# Altium schematic symbol library Crystal_Osilator.SchLib: 109 symbols (part 2 of 2)
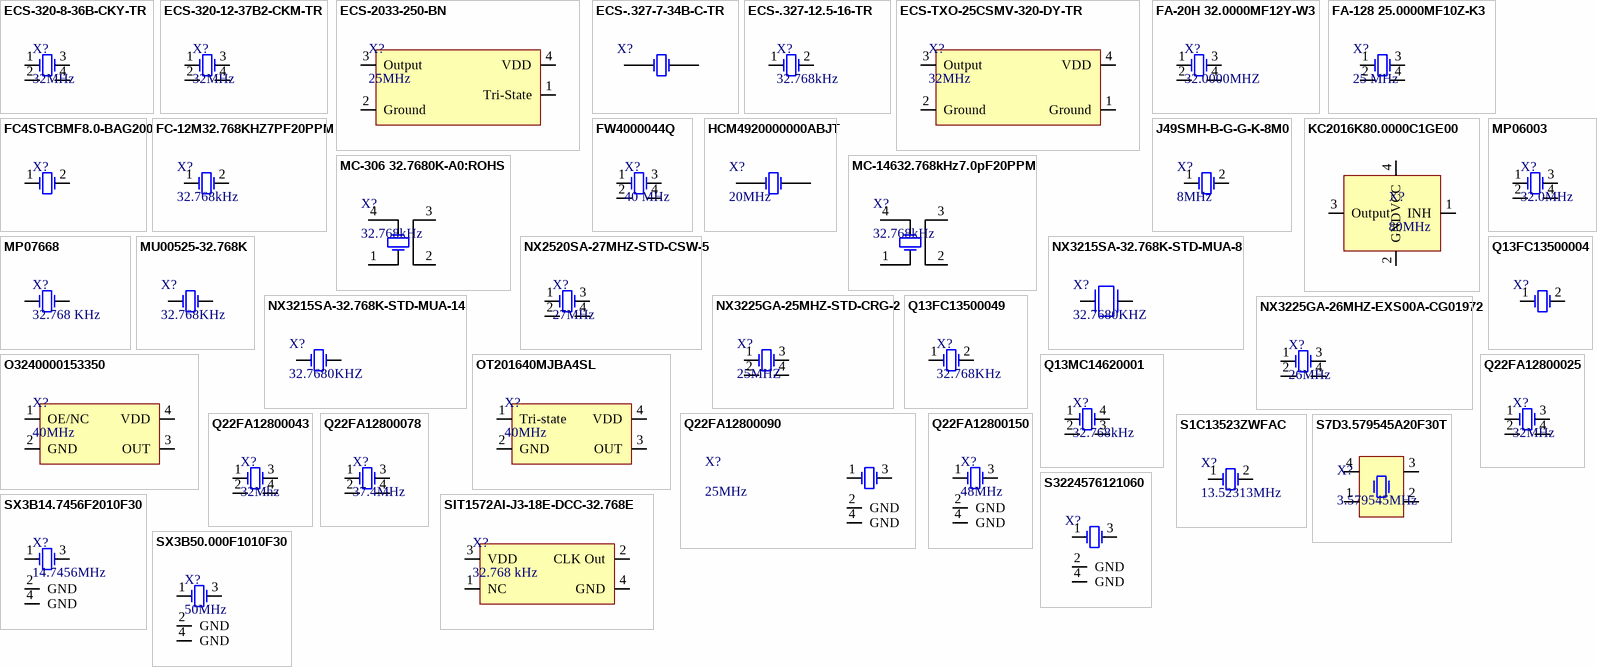
[diagram p3: symbols ECS-320-8-36B-CKY-TR to SX3B50.000F1010F30]

## NX3215SA-32.768K-STD-MUA-8
designator X?, comment 32.7680KHZ
CRYSTAL 32.7680KHZ 12.5PF SMD; Manufacturer: NDK; Manufacturer Part Number: NX3215SA-32.768K-STD-MUA-8; Frequency: 32.768kHz; Frequency Tolerance: 20ppm; ESR (Equivalent Series Resistance): 70kR; Supplier 1: Digi-Key; Stock 1: 29951; Pricing 1: 1=0.68, 10=0.602, 50=0.5628, 100=0.4974, 500=0.47124, 1000=0.3927 (USD); Mount: Surface Mount; Case/Package: SMD/SMT; Number of Pins: 2; Min Operating Temperature: -40°C; Max Operating Temperature: 85°C; Package Quantity: 1000; Load Capacitance: 12.5pF; Packaging: Tape and Reel; Length: 0.126inch; Height: 0.035inch; Width: 0.059inch; Lead Free: Lead Free; ComponentLink1URL: https://media.digikey.com/pdf/Data%20Sheets/NDK%20PDFs/NX3215SA-32.768K-STD-MUA-8.pdf?src-supplier=Digi-Key; ComponentLink1Description: https://media.digikey.com/pdf/Data%20Sheets/NDK%20PDFs/NX3215SA-32.768K-STD-MUA-8.pdf?src-supplier=Digi-Key; ComponentLink2URL: http://www.ndk.com/images/products/catalog/c_NX3215SA-STD-MUA-14_e.pdf?src-supplier=Digi-Key; ComponentLink2Description: http://www.ndk.com/images/products/catalog/c_NX3215SA-STD-MUA-14_e.pdf?src-supplier=Digi-Key; Supplier Part Number 1: 644-1156-6-ND; LCSC Part Number: C156245
footprint NX3215SA-32.768K-STD-MUA-8_
pins: 1, 2

## NX3215SA-32.768K-STD-MUA-14
designator X?, comment 32.7680KHZ
CRYSTAL 32.7680KHZ 6PF SMD; Manufacturer: NDK; Manufacturer Part Number: NX3215SA-32.768K-STD-MUA-14; Frequency: 32.768kHz; Frequency Tolerance: 20ppm; ESR (Equivalent Series Resistance): 70kR; Supplier 1: Rs; RoHS: Yes; Category: Crystals; Stock 1: 500; Pricing 1: 5=0.15520, 50=0.68600, 100=0.66600, 250=0.65000, 500=0.63400 (GBP); Mounting Technology: Surface Mount; Case/Package: SMD/SMT; Min Operating Temperature: -40°C; Max Operating Temperature: 85°C; Packaging: Cut Tape; Load Capacitance: 6pF; Series: NX3215SA; RoHS Compliant: Yes; ComponentLink1URL: https://datasheet.ciiva.com/6733/c-nx3215sa-std-mua-9-e-6733110.pdf?src-supplier=Digi-Key; ComponentLink1Description: https://datasheet.ciiva.com/6733/c-nx3215sa-std-mua-9-e-6733110.pdf?src-supplier=Digi-Key; ComponentLink2URL: https://datasheet.ciiva.com/6733/c-nx3215sa-std-mua-9-e-6733111.pdf?src-supplier=Digi-Key; ComponentLink2Description: https://datasheet.ciiva.com/6733/c-nx3215sa-std-mua-9-e-6733111.pdf?src-supplier=Digi-Key; ComponentLink3URL: https://datasheet.ciiva.com/6733/c-nx3215sa-std-mua-9-e-6733112.pdf?src-supplier=Digi-Key; ComponentLink3Description: https://datasheet.ciiva.com/6733/c-nx3215sa-std-mua-9-e-6733112.pdf?src-supplier=Digi-Key; Supplier Part Number 1: 1847854; LCSC Part Number: C156244; Item Type: Crystal
footprint NX3215SA-32.768K-STD-MUA-8_
pins: 1 OSC1, 2 OSC2

## NX3225GA-25MHZ-STD-CRG-2
designator X?, comment 25MHZ
SMD3225-4P Crystals ROHS; Manufacturer: NDK; Manufacturer Part Number: NX3225GA-25MHZ-STD-CRG-2; Package: SMD3225-4P; LCSC Part Number: C438901; Item Type: Crystal; ComponentLink1Description: LCSC; ComponentLink1URL: https://www.lcsc.com/product-detail/Crystals_NDK-NX3225GA-25MHZ-STD-CRG-2_C438901.html
footprint NX3225GA-25MHZ-STD-CRG-2
pins: 1 OSC1, 2 GND, 3 OSC2, 4 GND

## NX3225GA-26MHZ-EXS00A-CG01972
designator X?, comment 26MHz
SMD3225-4P Crystals ROHS; Manufacturer: NDK; Manufacturer Part Number: NX3225GA-26MHZ-EXS00A-CG01972; Package: SMD3225-4P; LCSC Part Number: C485372; Item Type: Crystal; ComponentLink1Description: LCSC; ComponentLink1URL: https://www.lcsc.com/product-detail/Crystals_NDK-NX3225GA-26MHZ-EXS00A-CG01972_C485372.html
footprint NX3225GA-26MHZ-EXS00A-CG01972
pins: 1 OSC1, 2 GND, 3 OSC2, 4 GND

## O3240000153350
designator X?, comment 40MHz
3.3V 5mA ±25ppm 40MHz CMOS SMD3225-4P Oscillators ROHS; Manufacturer: JGHC; Manufacturer Part Number: O3240000153350; Item Type: Crystal; Value: 40MHZ; LCSC Part Number: C437132; ComponentLink1Description: LCSC; ComponentLink1URL: https://www.lcsc.com/product-detail/Oscillators_JGHC-O3240000153350_C437132.html
footprint SMD3225-4P
pins: 1 OE/NC, 2 GND, 3 OUT, 4 VDD

## OT201640MJBA4SL
designator X?, comment 40MHz
1.8V~3.3V 4mA ±10ppm 40MHz SMD2016-4P Oscillators ROHS; Manufacturer: YXC; Manufacturer Part Number: OT201640MJBA4SL; Item Type: Crystal; Value: 40MHZ; LCSC Part Number: C669085; ComponentLink1Description: LCSC; ComponentLink1URL: https://www.lcsc.com/product-detail/Crystals_Yangxing-Tech-X322540MPB4SI_C9010.html
footprint SMD2016-4P
pins: 1 Tri-state, 2 GND, 3 OUT, 4 VDD

## Q13FC13500004
designator X?
32.768kHz Surface Mount Crystal 12.5pF ±20ppm SMD3215-2P Crystals ROHS; Manufacturer: Epson; Manufacturer Part Number: Q13FC13500004; Supplier: Farnell; LCSC Part Number: C32346; RoHS: Yes; Item Type: Crystals; Stock: 52665; Reach SVHC Compliant: 4187SVHC; ComponentLink1URL: https://datasheet.octopart.com/Q13FC13500004-Epson-datasheet-62043850.pdf?src-supplier=Farnell; ComponentLink1Description: https://datasheet.octopart.com/Q13FC13500004-Epson-datasheet-62043850.pdf?src-supplier=Farnell; ComponentLink2URL: https://datasheet.octopart.com/Q13FC13500004-Epson-datasheet-32025749.pdf?src-supplier=Newark; ComponentLink2Description: https://datasheet.octopart.com/Q13FC13500004-Epson-datasheet-32025749.pdf?src-supplier=Newark
footprint SMD3215-2P
pins: 1 OSC1, 2 OSC2

## Q13FC13500049
designator X?, comment 32.768KHz
Crystal, 32.768KHZ, 6PF, 3.2MM X 1.5MM Rohs Compliant: Yes; Manufacturer: Epson; Manufacturer Part Number: Q13FC13500049; Supplier: Farnell; LCSC Part Number: C95361; RoHS: No; Item Type: Crystal; Stock: 760; Pricing: 100=5.52, 250=5.41 (DKK)
footprint SMD3215-2P
pins: 1 OSC1, 2 OSC2

## Q13MC14620001
designator X?, comment 32.768kHz
32.768kHz 7pF ±20ppm MC-146 Crystals ROHS; Manufacturer: Seiko Epson; Manufacturer Part Number: Q13MC14620001; Package: MC-146; LCSC Part Number: C3013800; Item Type: Crystals; ComponentLink1Description: LCSC; ComponentLink1URL: https://www.lcsc.com/product-detail/Crystals_Seiko-span-style-background-color-ff0-Epson-span-Q13MC14620001_C3013800.html
footprint MC-146_
pins: 1 OSC1, 2 GND, 3 GND, 4 OSC2

## Q22FA12800025
designator X?, comment 32MHz
CRYSTAL 32.0000MHZ 8PF SMD; Manufacturer: Epson; Manufacturer Part Number: Q22FA12800025; Supplier: Farnell; LCSC Part Number: C187794; RoHS: Yes; Item Type: Crystal; Stock: 250; Pricing: 250=0.511 (GBP); ComponentLink1URL: http://ndap3-net.ebz.epson.co.jp/w/www/PDFS/epdoc_qd.nsf/85a4e2c523a1f89349257068002f9e30/255cb2884010a1f9492571f0004c7d72/$FILE/FA-128_E09X.pdf?src-supplier=Newark; ComponentLink1Description: http://ndap3-net.ebz.epson.co.jp/w/www/PDFS/epdoc_qd.nsf/85a4e2c523a1f89349257068002f9e30/255cb2884010a1f9492571f0004c7d72/$FILE/FA-128_E09X.pdf?src-supplier=Newark; ComponentLink2URL: http://www.farnell.com/datasheets/1734615.pdf?src-supplier=Newark; ComponentLink2Description: http://www.farnell.com/datasheets/1734615.pdf?src-supplier=Newark
footprint SMD2016-4P
pins: 1 OSC1, 2 GND, 3 OSC2, 4 GND

## Q22FA12800043
designator X?, comment 32Mhz
32MHz 8pF ±10ppm ±20ppm SMD2016-4P Crystals ROHS; Manufacturer: Epson; Manufacturer Part Number: Q22FA12800043; Supplier: Farnell; LCSC Part Number: C1986927; RoHS: No; Item Type: Crystal; Pricing: 1=1, 10=0.828, 25=0.765, 50=0.701, 100=0.638 (GBP); ComponentLink1URL: https://datasheet.octopart.com/Q22FA12800043-Epson-datasheet-61206169.pdf?src-supplier=Farnell; ComponentLink1Description: https://datasheet.octopart.com/Q22FA12800043-Epson-datasheet-61206169.pdf?src-supplier=Farnell
footprint SMD2016-4P
pins: 1 OSC1, 2 GND, 3 OSC2, 4 GND

## Q22FA12800078
designator X?, comment 37.4MHz
37.4MHz SMD Crystal Resonator 9pF 60Ω ±10ppm -40℃~+85℃ SMD2016-4P Crystals; Manufacturer: Seiko; Manufacturer Part Number: Q22FA12800078; Footprint: Custom; ComponentLink1Description: LCSC; ComponentLink1URL: https://www.lcsc.com/product-detail/Crystals_Seiko-Epson-Q22FA12800078_C255897.html; LCSC Part Number: C255897
footprint Q22FA12800078_ (37.4MHz SMD Crystal Resonator 9pF 60O ±10ppm -40?~+85? SMD2016-4P Crystals)
pins: 1 OSC1, 2 GND, 3 OSC2, 4 GND

## Q22FA12800090
designator X?, comment 25MHz
CRYSTAL 25.0000MHZ 12PF SMD; Manufacturer: Seiko Epson; Manufacturer Part Number: Q22FA12800090; ComponentLink1Description: LCSC; ComponentLink1URL: https://www.lcsc.com/product-detail/Crystals_Seiko-Epson-Q22FA12800090_C255883.html; Package: SMD2016-4P; LCSC Part Number: C255883; Item Type: Crystal
footprint Q22FA12800090
pins: 1 OSC1, 2 GND, 3 OSC2, 4 GND

## Q22FA12800150
designator X?, comment 48MHz
CRYSTAL 48.0000MHZ 10PF SMD; Manufacturer: Epson; Manufacturer Part Number: Q22FA12800150; Supplier: Farnell; LCSC Part Number: C255900; Item Type: Crystal; Pricing: 500=0.24 (GBP)
footprint SMD2016-4P
pins: 1 OSC1, 2 GND, 3 OSC2, 4 GND

## S1C13523ZWFAC
designator X?, comment 13.52313MHz
13.52313MHz In-line passive crystal oscillator 20pF 60Ω ±20ppm ±30ppm -40℃~+85℃ HC-49S-2P Crystals ROHS; Manufacturer: JYJE; Manufacturer Part Number: S1C13523ZWFAC; Package: HC-49S-2P; LCSC Part Number: C2681243; ComponentLink1Description: LCSC; ComponentLink1URL: https://www.lcsc.com/product-detail/Crystals_JYJE-S1C13523ZWFAC_C2681243.html
footprint HC-49S-2P
pins: 1 OSC1, 2 OSC2

## S7D3.579545A20F30T
designator X?, comment 3.579545MHz
5V~5V ±20ppm CMOS 3.579545MHz SMD7050-4P Oscillators ROHS; Manufacturer: Shenzhen SCTF Elec; Manufacturer Part Number: S7D3.579545A20F30T; Item Type: Crystal; Package: SMD7050-4P; LCSC Part Number: C386914; ComponentLink1Description: LCSC; ComponentLink1URL: https://www.lcsc.com/product-detail/Oscillators_Shenzhen-SCTF-Elec-S7D3-579545A20F30T_C386914.html
footprint SMD7050-4P
pins: 1 ENABLE CONTROL, 2 GND, 3 OUT PUT , 4 VDD

## S3224576121060
designator X?
24.576MHz SMD Crystal Resonator 12pF 60Ω ±10ppm -40℃~+85℃ SMD3225-4P Crystals ROHS; Manufacturer: JGHC; Manufacturer Part Number: S3224576121060; Footprint: Custom; ComponentLink1Description: LCSC; ComponentLink1URL: https://lcsc.com/product-detail/Crystals_JGHC-S3224576121060_C390772.html; Value: 24.576MHz; LCSC Part Number: C390772
footprint S3224576121060_ (24.576MHz SMD Crystal Resonator 12pF 60O ±10ppm -40?~+85? SMD3225-4P Crystals ROHS)
pins: 1 OSC1, 2 GND, 3 OSC2, 4 GND

## SIT1572AI-J3-18E-DCC-32.768E
designator X?, comment 32.768 kHz
MEMS OSC XO 32.7680KHZ LVCMOS; Manufacturer: SiTime; Manufacturer Part Number: SIT1572AI-J3-18E-DCC-32.768E; Item Type: Oscillators; Frequency Stability: 50ppm; Max Supply Current: 5.3uA; Supplier: Digikey; LCSC Part Number: C1988615; RoHS: Yes; Stock: 1183; Pricing: 1=1.91, 10=1.646, 50=1.4844, 100=1.4202, 500=1.28206 (USD); Mounting Technology: Surface Mount; Min Operating Temperature: -40°C; Max Operating Temperature: 85°C; Series: SiT1572; Packaging: Cut Tape; Frequency: 32.768kHz; RoHS Compliant: Yes; ComponentLink1URL: https://www.sitime.com/datasheet/SiT1572?src-supplier=Digikey; ComponentLink1Description: https://www.sitime.com/datasheet/SiT1572?src-supplier=Digikey
footprint SIT1572AI-J3-18E-DCC-32.768E
pins: 1 NC, 2 CLK Out, 3 VDD, 4 GND

## SX3B14.7456F2010F30
designator X?, comment 14.7456MHz
14.7456MHz Surface Mount Crystal 20pF ±10ppm ±30ppm SMD3225-4P Crystals ROHS; Manufacturer: Shenzhen SCTF Elec; Manufacturer Part Number: SX3B14.7456F2010F30; Supplier: LCSC; LCSC Part Number: C2901666; RoHS: No; Item Type: Crystal; Stock: 2580; Pricing: 5=0.0774, 50=0.0625, 150=0.0551, 500=0.0495, 3000=0.0447, 6000=0.0425 (USD)
footprint SMD3225-4P
pins: 1 OSC1, 2 GND, 3 OSC2, 4 GND

## SX3B50.000F1010F30
designator X?, comment 50MHz
50MHz 贴片晶振 10pF ±10ppm ±30ppm SMD3225-4P Crystals ROHS; Manufacturer: Shenzhen SCTF Elec; Manufacturer Part Number: SX3B50.000F1010F30; Package: SMD3225-4P; LCSC Part Number: C2901717; Item Type: Crystal; ComponentLink1Description: LCSC; ComponentLink1URL: https://www.lcsc.com/product-detail/Crystals_Shenzhen-SCTF-Elec-SX3B50-000F1010F30_C2901717.html
footprint SMD3225-4P
pins: 1 OSC1, 2 GND, 3 OSC2, 4 GND

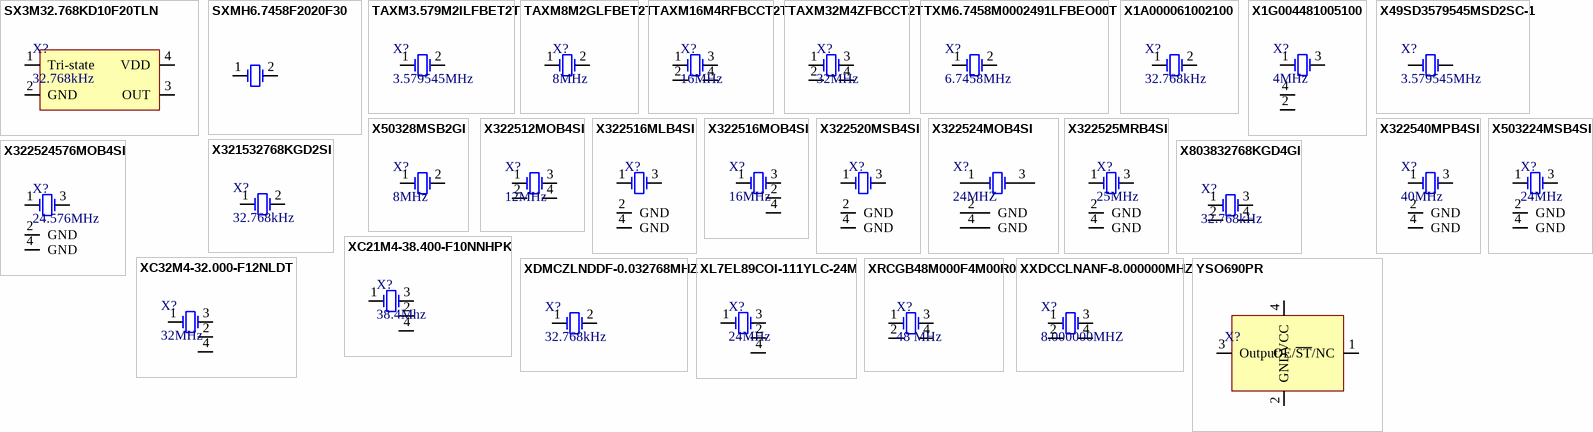
[diagram p2: symbols SX3M32.768KD10F20TLN to YSO690PR]

## SX3M32.768KD10F20TLN
designator X?, comment 32.768kHz
1.8V ±10ppm ±20ppm CMOS 32.768kHz SMD3225-4P Crystal Oscillators ROHS; Manufacturer: Shenzhen SCTF Elec; Manufacturer Part Number: SX3M32.768KD10F20TLN; Package: SMD3225-4P; LCSC Part Number: C21547574; Item Type: Crystal Oscillator; ComponentLink1Description: LCSC; ComponentLink1URL: https://www.lcsc.com/product-detail/Crystal-Oscillators_Shenzhen-SCTF-Elec-SX3M32-768KD10F20TLN_C21547574.html
footprint SMD3225-4P
pins: 1 Tri-state, 2 GND, 3 OUT, 4 VDD

## SXMH6.7458F2020F30
designator X?
6.7458MHz 20pF ±20ppm HC-49S-SMD Crystals ROHS; Manufacturer: Shenzhen SCTF Elec; Manufacturer Part Number: SXMH6.7458F2020F30; Package: HC-49S-SMD; LCSC Part Number: C2901748; Item Type: Crystals; ComponentLink1Description: LCSC; ComponentLink1URL: https://www.lcsc.com/product-detail/Crystals_Shenzhen-SCTF-Elec-SXMH6-7458F2020F30_C2901748.html
footprint HC-49S-SMD
pins: 1 OSC1, 2 OSC2

## TAXM3.579M2ILFBET2T
designator X?, comment 3.579545MHz
3.579545MHz 20pF ±30ppm HC-49S-SMD Crystals ROHS; Manufacturer: TAE; Manufacturer Part Number: TAXM3.579M2ILFBET2T; Package: HC-49S-SMD; LCSC Part Number: C362352; Item Type: Crystal; ComponentLink1Description: LCSC; ComponentLink1URL: https://www.lcsc.com/product-detail/Crystals_TAE-Zhejiang-Abel-Elec-TAXM3-579M2ILFBET2T_C362352.html
footprint HC-49S-SMD
pins: 1 OSC1, 2 OSC2

## TAXM8M2GLFBET2T
designator X?, comment 8MHz
8MHz Surface Mount Crystal 20pF ±30ppm ±30ppm HC-49S-SMD Crystals ROHS; Manufacturer: Yajingxin; Manufacturer Part Number: TAXM8M2GLFBET2T; Package: HC-49S-SMD; LCSC Part Number: C107426; Item Type: Crystal; ComponentLink1Description: LCSC; ComponentLink1URL: https://www.lcsc.com/product-detail/SMD-Crystal-Resonators_TAE-Zhejiang-Abel-Elec-HC-49SM8MHz20pF30ppm_C107426.html
footprint HC-49S-SMD
pins: 1 OSC1, 2 OSC2

## TAXM16M4RFBCCT2T
designator X?, comment 16MHz
16MHz 贴片晶振 12pF ±10ppm ±50ppm SMD3225-4P Crystals ROHS; Manufacturer: TAE(Zhejiang Abel Elec); Manufacturer Part Number: TAXM16M4RFBCCT2T; Supplier: LCSC; Supplier Part Number: C133336; RoHS: No; Category: Uncategorized; Item Type: Crystal
footprint SMD3225-4P
pins: 1 OSC1, 2 GND, 3 OSC2, 4 GND

## TAXM32M4ZFBCCT2T
designator X?, comment 32MHz
32MHz Surface Mount Crystal 12pF ±10ppm ±10ppm SMD2016-4P Crystals ROHS; Manufacturer: Yajingxin; Manufacturer Part Number: TAXM32M4ZFBCCT2T; Package: SMD2016-4P; LCSC Part Number: C388797; Item Type: Crystal; ComponentLink1Description: LCSC; ComponentLink1URL: https://www.lcsc.com/product-detail/Crystals_Yajingxin-TAXM32M4ZFBCCT2T_C388797.html?s_z=n_C388797
footprint SMD2016-4P
pins: 1 OSC1, 2 GND, 3 OSC2, 4 GND

## TXM6.7458M0002491LFBEO00T
designator X?, comment 6.7458MHz
6.7458MHz 20pF ±30ppm HC-49S-SMD Crystals ROHS; Manufacturer: Yajingxin; Manufacturer Part Number: TXM6.7458M0002491LFBEO00T; Package: HC-49S-SMD; LCSC Part Number: C362479; Item Type: Crystal; ComponentLink1Description: LCSC; ComponentLink1URL: https://www.lcsc.com/product-detail/Crystals_Yajingxin-TXM6-7458M0002491LFBEO00T_C362479.html
footprint TXM6.7458M0002491LFBEO00T
pins: 1 OSC1, 2 OSC2

## X1A000061002100
designator X?, comment 32.768kHz
32.768kHz SMD Crystal Resonator 6pF 90kΩ ±20ppm -40℃~+85℃ SMD2012-2P Crystals ROHS; Manufacturer Part Number: X1A000061002100; Manufacturer: Seiko Epson; ComponentLink1Description: LCSC; ComponentLink1URL: https://www.lcsc.com/product-detail/Crystals_Seiko-Epson-X1A000061002100_C255767.html; Value: 32.768kHz; LCSC Part Number: C255767; Item Type: Crystal
footprint X1A000061002100_
pins: 1 OSC1, 2 OSC2

## X1G004481005100
designator X?, comment 4MHz
4MHz ±100ppm 3mA 1.6V ~ 3.6V SMD7050-4P Oscillators ROHS; Manufacturer: Seiko; Manufacturer Part Number: X1G004481005100; Item Type: Crystal; Package: Custom; ComponentLink1Description: LCSC; ComponentLink1URL: https://lcsc.com/product-detail/Oscillators_Seiko-Epson-X1G004481005100_C70511.html; LCSC Part Number: C70511
footprint X1G004481005100_
pins: 1 OSC1, 2 GND, 3 OSC2, 4 VCC

## X49SD3579545MSD2SC-1
designator X?, comment 3.579545MHz
3.579545MHz 20pF ±20ppm ±30ppm HC-49S Crystals ROHS; Manufacturer: Yangxing Tech; Manufacturer Part Number: X49SD3579545MSD2SC-1; Package: HC-49S; LCSC Part Number: C2195; Item Type: Crystal; ComponentLink1Description: LCSC; ComponentLink1URL: https://www.lcsc.com/product-detail/Crystals_Yangxing-Tech-X49SD3579545MSD2SC-1_C2195.html
footprint X49SD3579545MSD2SC-1
pins: 1 OSC1, 2 OSC2

## X50328MSB2GI
designator X?, comment 8MHz
8MHz 20pF ±10ppm ±50ppm SMD5032-2P Crystals ROHS; Manufacturer: Yangxing Tech; Manufacturer Part Number: X50328MSB2GI; Package: SMD5032-2P; LCSC Part Number: C115962; Item Type: Crystal; ComponentLink1Description: LCSC; ComponentLink1URL: https://www.lcsc.com/product-detail/Crystals_Yangxing-Tech-X50328MSB2GI_C115962.html
footprint SMD5032-2P
pins: 1 OSC1, 2 OSC2

## X322512MOB4SI
designator X?, comment 12MHz
12MHz SMD Crystal Resonator 12pF ±10ppm ±30ppm -40℃~+85℃ SMD3225-4P Crystals ROHS; Manufacturer: Yangxing Tech; Manufacturer Part Number: X322512MOB4SI; ComponentLink1Description: LCSC; ComponentLink1URL: https://www.lcsc.com/product-detail/Crystals_Yangxing-Tech-X322512MOB4SI_C70565.html; Package: SMD3225-4P; LCSC Part Number: C70565; Item Type: Crystal
footprint X322512MOB4SI_
pins: 1, 2 GND, 3, 4 GND

## X322516MLB4SI
designator X?
16MHz SMD Crystal Resonator 9pF ±10ppm ±30ppm -40℃~+85℃ SMD3225-4P Crystals ROHS; Manufacturer: Yangxing Tech; Manufacturer Part Number: X322516MLB4SI; Package: SMD3225-4P; ComponentLink1Description: LCSC; ComponentLink1URL: https://www.lcsc.com/product-detail/Crystals_Yangxing-Tech-X322516MLB4SI_C13738.html; LCSC Part Number: C13738; Item Type: Crystal
footprint SMD3225-4P
pins: 1 CRYSTAL, 2 GND, 3 CRYSTAL, 4 GND

## X322516MOB4SI
designator X?, comment 16MHz
16MHz SMD Crystal Resonator 12pF ±10ppm ±30ppm -40℃~+85℃ SMD3225-4P Crystals ROHS; Manufacturer: Yangxing Tech; Manufacturer Part Number: X322516MOB4SI; Footprint: Custom; ComponentLink1Description: LCSC; ComponentLink1URL: https://www.lcsc.com/product-detail/Crystals_Yangxing-Tech-X322516MOB4SI_C12668.html; LCSC Part Number: C12668; Item Type: Crystal
footprint X322516MOB4SI_ (16MHz SMD Crystal Resonator 12pF)
pins: 1 OSC1, 2 GND, 3 OSC2, 4 GND

## X322520MSB4SI
designator X?
20MHz Surface Mount Crystal 20pF ±10ppm ±20ppm SMD3225-4P Crystals ROHS; Manufacturer: YXC Crystal Oscillators; Manufacturer Part Number: X322520MSB4SI; Package: SMD3225-4P; LCSC Part Number: C9004; Item Type: Crystals; ComponentLink1Description: LCSC; ComponentLink1URL: https://www.lcsc.com/product-detail/Crystals_YXC-Crystal-Oscillators-X322520MSB4SI_C9004.html
footprint SMD3225-4P
pins: 1 OSC1, 2 GND, 3 OSC2, 4 GND

## X322524MOB4SI
designator X?, comment 24MHZ
24MHz SMD Crystal Resonator 12pF ±10ppm ±30ppm -40℃~+85℃ SMD3225-4P Crystals ROHS; Manufacturer: Yangxing Tech; Manufacturer Part Number: X322524MOB4SI; ComponentLink1Description: LCSC; ComponentLink1URL: https://www.lcsc.com/product-detail/Crystals_Yangxing-Tech-X322524MOB4SI_C70590.html; Footprint: Custom; LCSC Part Number: C70590; Item Type: Crystal
footprint X322524MOB4SI-
pins: 1 CRYSTAL, 2 GND, 3 CRYSTAL, 4 GND

## X322525MRB4SI
designator X?, comment 25MHz
25MHz 贴片晶振 18pF ±10ppm ±20ppm SMD3225-4P Crystals ROHS; Manufacturer: YXC; Manufacturer Part Number: X322525MRB4SI; Supplier: LCSC; LCSC Part Number: C70593; RoHS: No; Item Type: Crystal
footprint SMD3225-4P
pins: 1 CRYSTAL, 2 GND, 3 CRYSTAL, 4 GND

## X322540MPB4SI
designator X?, comment 40MHz
40MHz SMD Crystal Resonator 15pF SMD3225-4P Crystals ROHS; Manufacturer: Yangxing Tech; Manufacturer Part Number: X322540MPB4SI; Value: 40MHZ; LCSC Part Number: C9010; ComponentLink1Description: LCSC; ComponentLink1URL: https://www.lcsc.com/product-detail/Crystals_Yangxing-Tech-X322540MPB4SI_C9010.html; Item Type: Crystal
footprint X322540MPB4SI_
pins: 1 CRYSTAL, 2 GND, 3 CRYSTAL, 4 GND

## X503224MSB4SI
designator X?, comment 24MHz
24MHz Surface Mount Crystal 20pF ±10ppm ±20ppm SMD5032-4P Crystals ROHS; Manufacturer: YXC; Manufacturer Part Number: X503224MSB4SI; Supplier: LCSC; LCSC Part Number: C112587; RoHS: No; Item Type: Crystal; Stock: 390; Pricing: 5=0.2572, 50=0.2054, 150=0.1832, 1000=0.1377, 2000=0.1253, 5000=0.1179 (USD)
footprint SMD5032-4P
pins: 1 CRYSTAL, 2 GND, 3 CRYSTAL, 4 GND

## X321532768KGD2SI
designator X?, comment 32.768kHz
32.768kHz SMD Crystal Resonator 12.5pF ±20ppm -40℃~+85℃ SMD3215-2P Crystals ROHS; Manufacturer: Yangxing Tech; Manufacturer Part Number: X321532768KGD2SI; Footprint: Custom; ComponentLink1Description: LCSC; ComponentLink1URL: https://www.lcsc.com/product-detail/Crystals_Yangxing-Tech-X321532768KGD2SI_C620155.html; LCSC Part Number: C620155; Item Type: Crystal
footprint X321532768KGD2SI_
pins: 1 OSC1, 2 OSC2

## X322524576MOB4SI
designator X?, comment 24.576MHz
24.576MHz Surface Mount Crystal 12pF ±10ppm ±20ppm SMD3225-4P Crystals ROHS; Manufacturer: YXC; Manufacturer Part Number: X322524576MOB4SI; Supplier: LCSC; LCSC Part Number: C70568; RoHS: No; Item Type: Crystal; ComponentLink1Description: LCSC; ComponentLink1URL: https://www.lcsc.com/product-detail/Crystals_YXC-Crystal-Oscillators-X322524576MOB4SI_C70568.html?s_z=n_X322524576MOB4SI
footprint SMD3225-4P
pins: 1 CRYSTAL, 2 GND, 3 CRYSTAL, 4 GND

## X803832768KGD4GI
designator X?, comment 32.768kHz
32.768kHz 12.5pF ±20ppm MC-306 Crystals ROHS; Manufacturer: YXC; Manufacturer Part Number: X803832768KGD4GI; Package: MC-306; LCSC Part Number: C12675; Item Type: Crystal
footprint MC-306
pins: 1 OSC1, 2 GND, 3 OSC2, 4 GND

## XC21M4-38.400-F10NNHPK
designator X?, comment 38.4Mhz
CRYSTAL 38.4MHZ 10PF SMD; Manufacturer: Suzhou Hangjing Elec&Tech Co.,Ltd; Manufacturer Part Number: XC21M4-38.400-F10NNHPK; Package: 4-SMD, No Lead; LCSC Part Number: -; Item Type: Crystal; ComponentLink1Description: LCSC; ComponentLink1URL: *
footprint XC21M4-38.400-F10NNHPK
pins: 1 OSC1, 2 GND, 3 OSC2, 4 GND

## XC32M4-32.000-F12NLDT
designator X?, comment 32MHz
32MHz SMD Crystal Resonator 12pF 40Ω ±10ppm ±20ppm -40℃~+85℃ SMD3225-4P Crystals ROHS; Manufacturer: HCI; Manufacturer Part Number: XC32M4-32.000-F12NLDT; Footprint: Custom; LCSC Part Number: C2905357; Item Type: Crystal; ComponentLink1Description: LCSC; ComponentLink1URL: https://www.lcsc.com/product-detail/Crystals_HCI-XC32M4-32-000-F12NLDT_C2905357.html
footprint XC32M4-32.000-F12NLDT_
pins: 1 OSC1, 2 GND, 3 OSC2, 4 GND

## XDMCZLNDDF-0.032768MHZ
designator X?, comment 32.768kHz
32.768kHz 贴片晶振 12.5pF ±20ppm ±20ppm SMD3215-2P Crystals ROHS; Manufacturer: TAITIEN Elec; Manufacturer Part Number: XDMCZLNDDF-0.032768MHZ; Package: SMD3215-2P; LCSC Part Number: C521573; Item Type: Crystal; ComponentLink1Description: LCSC; ComponentLink1URL: https://www.lcsc.com/product-detail/Crystals_TAITIEN-Elec-XDMCZLNDDF-0-032768MHZ_C521573.html
footprint SMD3215-2P
pins: 1 OSC1, 2 OSC2

## XL7EL89COI-111YLC-24M
designator X?, comment 24MHz
24MHz Surface Mount Crystal 12pF ±10ppm ±20ppm SMD2016-4P Crystals ROHS; Manufacturer: YXC; Manufacturer Part Number: XL7EL89COI-111YLC-24M; Package: SMD2016-4; LCSC Part Number: C22434877; Item Type: Crystal; ComponentLink1Description: LCSC; ComponentLink1URL: https://www.lcsc.com/product-detail/Crystals_YXC-Crystal-Oscillators-XL7EL89COI-111YLC-24M_C22434877.html
footprint SMD2016-4P
pins: 1 OSC1, 2 GND, 3 OSC2, 4 GND

## XRCGB48M000F4M00R0
designator X?, comment 48 MHz
CRYSTAL 48.0000MHZ 6PF SMD; Manufacturer: Murata; Manufacturer Part Number: XRCGB48M000F4M00R0; Item Type: Crystals; Supplier: Mouser; LCSC Part Number: C1986590; RoHS: Yes; Stock: 4711; Pricing: 1=0.3, 10=0.231, 50=0.231, 100=0.211, 1000=0.179, 10000=0.128 (USD); ComponentLink1URL: https://datasheet.ciiva.com/3852/part29-3852564.pdf?src-supplier=Arrow+Electronics; ComponentLink1Description: https://datasheet.ciiva.com/3852/part29-3852564.pdf?src-supplier=Arrow+Electronics; ComponentLink2URL: https://datasheet.ciiva.com/852/p79e-852304.pdf?src-supplier=Digikey; ComponentLink2Description: https://datasheet.ciiva.com/852/p79e-852304.pdf?src-supplier=Digikey; ComponentLink3URL: https://datasheet.ciiva.com/852/p79e-852305.pdf?src-supplier=Digikey; ComponentLink3Description: https://datasheet.ciiva.com/852/p79e-852305.pdf?src-supplier=Digikey; ComponentLink4URL: https://datasheet.ciiva.com/852/p79e-852306.pdf?src-supplier=Digikey; ComponentLink4Description: https://datasheet.ciiva.com/852/p79e-852306.pdf?src-supplier=Digikey; ComponentLink5URL: https://datasheet.ciiva.com/1369/l0445e-1369913.pdf?src-supplier=Farnell; ComponentLink5Description: https://datasheet.ciiva.com/1369/l0445e-1369913.pdf?src-supplier=Farnell; ComponentLink6URL: https://datasheet.ciiva.com/1361/p79e-1361575.pdf?src-supplier=Element14; ComponentLink6Description: https://datasheet.ciiva.com/1361/p79e-1361575.pdf?src-supplier=Element14
footprint SMD2016-4P
pins: 1 OSC1, 2 GND, 3 OSC2, 4 GND

## XXDCCLNANF-8.000000MHZ
designator X?, comment 8.000000MHZ
12pF -40℃~85℃ 贴片无源晶振 ±20ppm 8000000Hz SMD3225-4P Crystals ROHS; Manufacturer Part Number: XXDCCLNANF-8.000000MHZ; Manufacturer: TAITIEN Elec; Package: Custom; Value: 8.000000MHZ; ComponentLink1Description: LCSC; ComponentLink1URL: https://www.lcsc.com/product-detail/Crystals_TAITIEN-Elec-XXDCCLNANF-8-000000MHZ_C521664.html; LCSC Part Number: C521664; Item Type: Crystal
footprint XXDCCLNANF-8.000000MHZ_
pins: 1 OSC1, 2 GND, 3 OSC2, 4 GND

## YSO690PR
designator X?
80.00000MHz 3.3V-/+20PPM; Manufacturer: YXC; Manufacturer Part number: YSO690PR; ComponentLink1Description: Datasheet; ComponentLink1URL: http://oss.mokotechnology.com/uploads/20240304/1709535755274_YSO690PR%2080MHZ%203.3V%20%C2%B120PPM%20CMOS%20O97EI-112-80M.pdf
footprint YSO690PR
pins: 1 OE/~{ST}/NC, 2 GND, 3 Output, 4 VCC